# Altium schematic symbol library Tony_.SchLib: 178 symbols (part 1 of 6)
Pins are listed as number, name and electrical type; pins without a type are passive.

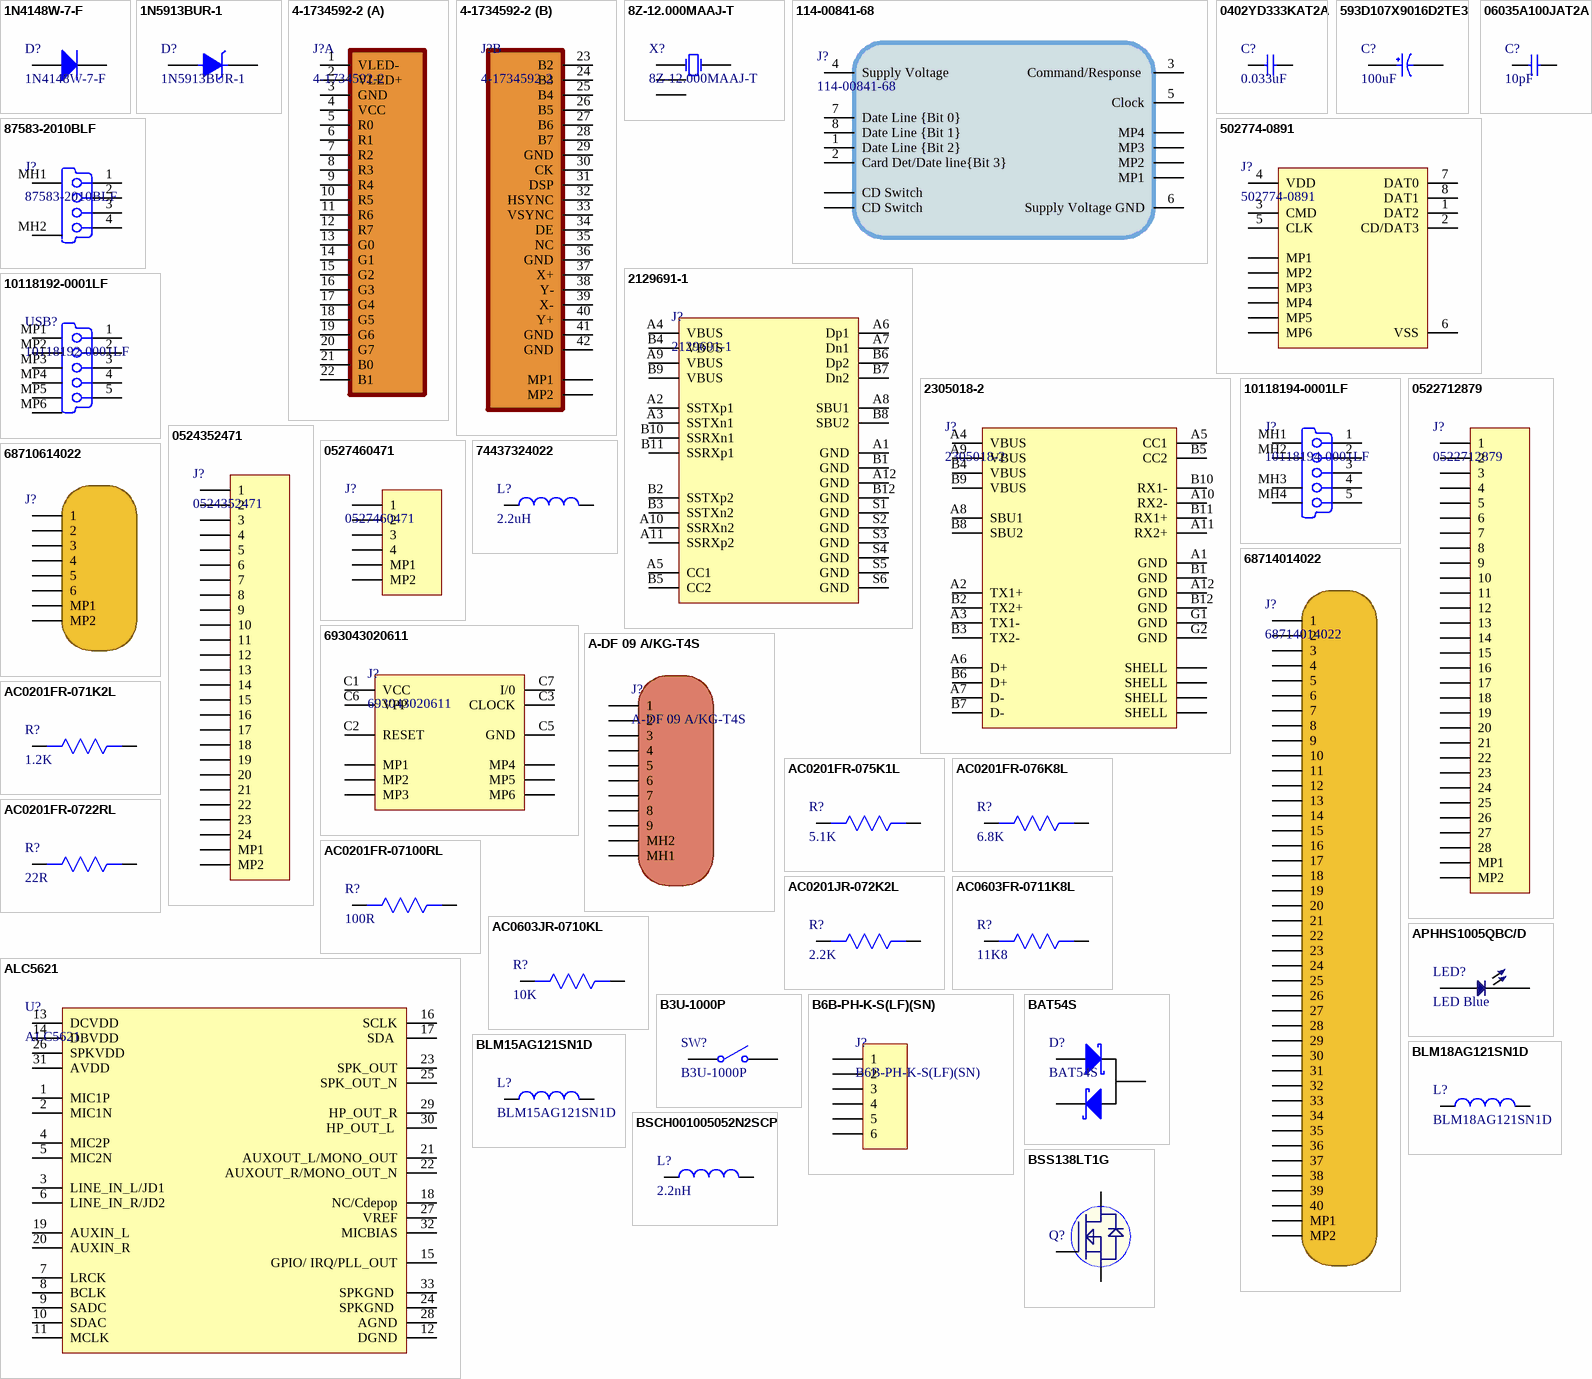
[diagram p0: symbols 1N4148W-7-F to BSS138LT1G]

## 1N4148W-7-F
designator D?
DIODE GEN PURP 100V 300MA SOD123; Manufacturer: Diodes; Forward Current: 150mA; Reverse Recovery Time: 4ns; Max Forward Surge Current (Ifsm): 2A; Element Configuration: Single; Peak Reverse Current: 1uA; Forward Voltage: 1.25V; Power Dissipation: 400mW; Polarity: Standard; Voltage Rating (DC): 75V; Capacitance: 2pF; Supplier 1: Digi-Key; Manufacturer Part Number: 1N4148W-7-F; Stock 1: 3949286; Pricing 1: 1=0.16, 10=0.146, 25=0.1388, 100=0.0611, 250=0.05868, 500=0.048, 1000=0.03333 (USD); Mount: Surface Mount; Number of Pins: 2; Weight: 0.000353oz; Contact Plating: Tin,Matte; Min Operating Temperature: -65°C; Max Operating Temperature: 150°C; Packaging: Tape and Reel; Max Repetitive Reverse Voltage (Vrrm): 100V; Peak Non-Repetitive Surge Current: 2A; Voltage: 100V; Max Surge Current: 2A; Package Quantity: 3000; Recovery Time: 4ns; Average Rectified Current: 300mA; Power Rating: 400mW; Current Rating: 150mA; Output Current: 150mA; Max Reverse Voltage (DC): 100V; Length: 2.85mm; Height: 1.25mm; Width: 1.7mm; Radiation Hardening: No; REACH SVHC: No SVHC; Lead Free: Lead Free; ComponentLink1URL: https://www.diodes.com/assets/Datasheets/ds30086.pdf?src-supplier=Digi-Key; ComponentLink1Description: https://www.diodes.com/assets/Datasheets/ds30086.pdf?src-supplier=Digi-Key; ComponentLink2URL: http://www.farnell.com/datasheets/2238378.pdf?src-supplier=Element14; ComponentLink2Description: http://www.farnell.com/datasheets/2238378.pdf?src-supplier=Element14; ComponentLink3URL: http://www.mouser.com/ds/2/115/ds30086-60872.pdf?src-supplier=Mouser; ComponentLink3Description: http://www.mouser.com/ds/2/115/ds30086-60872.pdf?src-supplier=Mouser; ComponentLink4URL: https://www.diodes.com/assets/Datasheets/ds30086.pdf?src-supplier=Avnet; ComponentLink4Description: https://www.diodes.com/assets/Datasheets/ds30086.pdf?src-supplier=Avnet; ComponentLink5URL: https://www.diodes.com/assets/Datasheets/ds30086.pdf?src-supplier=Avnet+Europe; ComponentLink5Description: https://www.diodes.com/assets/Datasheets/ds30086.pdf?src-supplier=Avnet+Europe; ComponentLink6URL: https://www.diodes.com/assets/Datasheets/ds30086.pdf?src-supplier=Verical; ComponentLink6Description: https://www.diodes.com/assets/Datasheets/ds30086.pdf?src-supplier=Verical; Supplier Part Number 1: 1N4148W-FDICT-ND
footprint SOD-123
pins: 1 A, 2 K

## 1N5913BUR-1
designator D?
DIODE ZENER 3.3V 1.25W DO213AB; Manufacturer: Microsemi; Tolerance: 5%; Impedance: 10R; Max Reverse Leakage Current: 100uA; Element Configuration: Single; Supplier 1: Mouser; Manufacturer Part Number: 1N5913BUR-1; RoHS: No; Category: Zener Diodes; Stock 1: 85; Pricing 1: 1=3.01000, 10=3.01000, 50=3.01000, 100=2.80000, 1000=2.80000, 10000=2.80000 (USD); Mount: Surface Mount; Case/Package: DO-213AB; Number of Pins: 2; Min Operating Temperature: -65°C; Max Operating Temperature: 175°C; Packaging: Bulk; Max Power Dissipation: 1.25W; Zener Voltage: 3.3V; Series: -; Radiation Hardening: Yes; RoHS Compliant: No; ComponentLink1URL: https://datasheet.ciiva.com/29596/lds-0300-1-29596489.pdf?src-supplier=Digi-Key; ComponentLink1Description: https://datasheet.ciiva.com/29596/lds-0300-1-29596489.pdf?src-supplier=Digi-Key; Supplier Part Number 1: 494-1N5913BUR-1
footprint DO-213AB
pins: 1 CATHODE, 2 ANODE

## 4-1734592-2
designator J?
CONN FPC BOTTOM 42POS 0.50MM R/A; Manufacturer: TE Connectivity; Connector Type: Receptacle,Connector,Socket; Wire/Cable Type: Flat Flex; Connector System: Flex-to-Board; Mating Alignment: Yes (With); PCB Mount Alignment: No (Without); PCB Mount Retention: With; Current Rating: 500mA; Voltage Rating: 250V; Shielding: Unshielded; Number of Positions: 42; Gender: Receptacle; PCB Mounting Orientation: Right Angle; Contact Resistance: 35mR; Pitch: 0.5mm; Plating Thickness: 0.025um; Supplier 1: Digi-Key; Manufacturer Part Number: 4-1734592-2; RoHS: Yes; Category: FFC / FPC; Stock 1: 5453; Pricing 1: 1=1.71000, 10=1.55300, 25=1.45800, 50=1.39480, 100=1.33130, 250=1.20456, 500=1.10944, 1000=0.95096, 2500=0.88756 (USD); Mount: Surface Mount; Housing Material: Polymer; Contact Plating: Gold; Contact Material: Bronze; Housing Color: Natural; Min Operating Temperature: -40°C; Max Operating Temperature: 85°C; Number of Rows: 1; Sealable: No (Without); Shrouded: Yes (With); Package Quantity: 2000; Packaging: Tape and Reel; Termination: SMD/SMT; Number of Contacts: 42; Contact Current Rating: 500mA; Orientation: Right Angle; Max Voltage Rating (AC): 250V; Length: 26.43mm; Width: 5.1mm; Height: 2.05mm; Flammability Rating: UL94 V-0; ELV: Compliant; REACH SVHC: Unknown; ComponentLink1URL: https://datasheet.ciiva.com/5751/1650059-5751062.pdf?src-supplier=Farnell; ComponentLink1Description: https://datasheet.ciiva.com/5751/1650059-5751062.pdf?src-supplier=Farnell; ComponentLink2URL: https://datasheet.ciiva.com/669/eng-cd-1734592-c-c-1734592-669223.pdf?src-supplier=Digi-Key; ComponentLink2Description: https://datasheet.ciiva.com/669/eng-cd-1734592-c-c-1734592-669223.pdf?src-supplier=Digi-Key; ComponentLink3URL: https://datasheet.ciiva.com/669/eng-cd-1734592-c-c-1734592-669224.pdf?src-supplier=Digi-Key; ComponentLink3Description: https://datasheet.ciiva.com/669/eng-cd-1734592-c-c-1734592-669224.pdf?src-supplier=Digi-Key; ComponentLink4URL: https://datasheet.ciiva.com/669/eng-cd-1734592-c-c-1734592-669225.pdf?src-supplier=Digi-Key; ComponentLink4Description: https://datasheet.ciiva.com/669/eng-cd-1734592-c-c-1734592-669225.pdf?src-supplier=Digi-Key; ComponentLink5URL: https://datasheet.ciiva.com/8066/1650059-8066860.pdf?src-supplier=Element14; ComponentLink5Description: https://datasheet.ciiva.com/8066/1650059-8066860.pdf?src-supplier=Element14; ComponentLink6URL: https://datasheet.ciiva.com/10365/eng-ds-1-1773440-6-0506-10365933.pdf?src-supplier=Avnet; ComponentLink6Description: https://datasheet.ciiva.com/10365/eng-ds-1-1773440-6-0506-10365933.pdf?src-supplier=Avnet; ComponentLink7URL: https://datasheet.ciiva.com/30083/eng-ds-1-1773440-6-0506-30083485.pdf?src-supplier=Onlinecomponents.com; ComponentLink7Description: https://datasheet.ciiva.com/30083/eng-ds-1-1773440-6-0506-30083485.pdf?src-supplier=Onlinecomponents.com; Supplier Part Number 1: A101322CT-ND
footprint 4-1734592-2 (CONN FPC BOTTOM 42POS 0.50MM R/A)
part A pins: 1 VLED-, 2 VLED+, 3 GND, 4 VCC, 5 R0, 6 R1, 7 R2, 8 R3, 9 R4, 10 R5, 11 R6, 12 R7, 13 G0, 14 G1, 15 G2, 16 G3, 17 G4, 18 G5, 19 G6, 20 G7, 21 B0, 22 B1
part B pins: 23 B2, 24 B3, 25 B4, 26 B5, 27 B6, 28 B7, 29 GND, 30 CK, 31 DSP, 32 HSYNC, 33 VSYNC, 34 DE, 35 NC, 36 GND, 37 X+, 38 Y-, 39 X-, 40 Y+, 41 GND, 42 GND, MP1, MP2

## 8Z-12.000MAAJ-T
designator X?
CRYSTAL 12.0000MHZ 18PF SMD; Manufacturer: TXC; Frequency: 12MHz; Frequency Tolerance: 30ppm; ESR (Equivalent Series Resistance): 150R; Supplier 1: Mouser; Manufacturer Part Number: 8Z-12.000MAAJ-T; RoHS: Yes; Category: Crystals; Stock 1: 33; Pricing 1: 1=1.41000, 10=1.36000, 50=1.33000, 100=1.13000, 1000=0.93000, 10000=0.78000 (USD); Mount: Surface Mount; Case/Package: SMD/SMT; Number of Pins: 4; Min Operating Temperature: -20°C; Max Operating Temperature: 70°C; Package Quantity: 1; Load Capacitance: 18pF; Packaging: Tape and Reel; Tolerance: 30ppm; Frequency Stability: 30ppm; Termination: SMD/SMT; Series: 8Z; Length: 2.5mm; Width: 0.079inch; Height: 0.022inch; Depth: 2mm; REACH SVHC: No SVHC; RoHS Compliant: Yes; ComponentLink1URL: https://datasheet.ciiva.com/28498/1838674-28498900.pdf?src-supplier=Element14; ComponentLink1Description: https://datasheet.ciiva.com/28498/1838674-28498900.pdf?src-supplier=Element14; ComponentLink2URL: https://datasheet.ciiva.com/4950/8z-12784-4950167.pdf?src-supplier=Mouser; ComponentLink2Description: https://datasheet.ciiva.com/4950/8z-12784-4950167.pdf?src-supplier=Mouser; ComponentLink3URL: https://datasheet.ciiva.com/859/8z-859073.pdf?src-supplier=Digi-Key; ComponentLink3Description: https://datasheet.ciiva.com/859/8z-859073.pdf?src-supplier=Digi-Key; ComponentLink4URL: https://datasheet.ciiva.com/859/8z-859071.pdf?src-supplier=Digi-Key; ComponentLink4Description: https://datasheet.ciiva.com/859/8z-859071.pdf?src-supplier=Digi-Key; ComponentLink5URL: https://datasheet.ciiva.com/859/8z-859072.pdf?src-supplier=Digi-Key; ComponentLink5Description: https://datasheet.ciiva.com/859/8z-859072.pdf?src-supplier=Digi-Key; ComponentLink6URL: https://datasheet.ciiva.com/8047/1041872-8047871.pdf?src-supplier=Element14; ComponentLink6Description: https://datasheet.ciiva.com/8047/1041872-8047871.pdf?src-supplier=Element14; Supplier Part Number 1: 717-8Z-12.000MAAJ-T
footprint 8Z-12.000MAAJ-T
pins: 1 OSC1, 2 GND, 3 OSC2, 4 GND

## 114-00841-68
designator J?
CONN MICRO SD CARD PUSH-PULL R/A; Manufacturer: AMPHENOL ICC (COMMERCIAL PRODUCTS); Connector Type: Connector; Supplier 1: Digi-Key; Manufacturer Part Number: 114-00841-68; Stock 1: 29968; Pricing 1: 1=1.32, 10=1.194, 25=1.1208, 50=1.0722, 100=1.0235, 250=0.926, 500=0.8529 (USD); Mount: Surface Mount; Contact Plating: Gold; Packaging: Tape and Reel; Supplier Part Number 1: 114-00841-68-6-ND
footprint 114-00841-68
pins: 1 Date Line {Bit 2}, 2 Card Det/Date line{Bit 3}, 3 Command/Response , 4 Supply Voltage (power), 5 Clock, 6 Supply Voltage GND (power), 7 Date Line {Bit 0}, 8 Date Line {Bit 1}, #CD Switch CD Switch, *CD Switch CD Switch, MP1, MP2, MP3, MP4

## 0402YD333KAT2A
designator C?, comment 0.033uF
CAP CER 0.033UF 16V X5R 0402; Manufacturer: Kyocera AVX; Manufacturer Part Number: 0402YD333KAT2A; Capacitance: 33nF; Tolerance: 10%; Supplier 1: Digi-Key; RoHS: Yes; Category: Ceramic Capacitors; Stock 1: 19862; Pricing 1: 1=0.14000, 10=0.10200, 50=0.05780, 100=0.04780, 500=0.03356, 1000=0.02778, 2500=0.02585, 5000=0.02365 (USD); Mount: Surface Mount; Case/Package: 0402; Number of Pins: 2; Case Code (Metric): 1005; Case Code (Imperial): 0402; Weight: 2.3E-05oz; Min Operating Temperature: -55°C; Max Operating Temperature: 85°C; Packaging: Tape and Reel; Voltage Rating (DC): 16V; Dielectric: X5R; Voltage Rating: 16V; Package Quantity: 10000; Termination: SMD/SMT; Series: 0402; Construction: Flat; Length: 1mm; Width: 0.02inch; Height: 0.56mm; Thickness: 0.022inch; Depth: 0.5mm; Radiation Hardening: No; REACH SVHC: No SVHC; Lead Free: Lead Free; RoHS Compliant: Yes; ComponentLink1URL: https://datasheet.ciiva.com/22619/1666675-22619797.pdf?src-supplier=Element14; ComponentLink1Description: https://datasheet.ciiva.com/22619/1666675-22619797.pdf?src-supplier=Element14; ComponentLink2URL: https://datasheet.ciiva.com/150/cx5r-150518.pdf?src-supplier=Digi-Key; ComponentLink2Description: https://datasheet.ciiva.com/150/cx5r-150518.pdf?src-supplier=Digi-Key; ComponentLink3URL: https://datasheet.ciiva.com/150/cx5r-150519.pdf?src-supplier=Digi-Key; ComponentLink3Description: https://datasheet.ciiva.com/150/cx5r-150519.pdf?src-supplier=Digi-Key; ComponentLink4URL: https://datasheet.ciiva.com/150/cx5r-150520.pdf?src-supplier=Digi-Key; ComponentLink4Description: https://datasheet.ciiva.com/150/cx5r-150520.pdf?src-supplier=Digi-Key; ComponentLink5URL: https://datasheet.ciiva.com/28454/1666675-28454250.pdf?src-supplier=Element14; ComponentLink5Description: https://datasheet.ciiva.com/28454/1666675-28454250.pdf?src-supplier=Element14; ComponentLink6URL: https://datasheet.ciiva.com/5421/cx5r-5421803.pdf?src-supplier=Mouser; ComponentLink6Description: https://datasheet.ciiva.com/5421/cx5r-5421803.pdf?src-supplier=Mouser; ComponentLink7URL: https://datasheet.ciiva.com/15212/getdatasheetpartid-310214-15212123.pdf?src-supplier=Verical; ComponentLink7Description: https://datasheet.ciiva.com/15212/getdatasheetpartid-310214-15212123.pdf?src-supplier=Verical; Supplier Part Number 1: 478-1123-1-ND
footprint Cap0402
pins: 1, 2

## 593D107X9016D2TE3
designator C?, comment 100uF
CAP TANT 100UF 10% 16V 2917; Manufacturer: Vishay Sprague; Manufacturer Part Number: 593D107X9016D2TE3; Tolerance: 20%; ESR (Equivalent Series Resistance): 125mR; Ripple Current: 1.1mA; Leakage Current: 16uA; Polarity: Polar; Dissipation Factor: 8%; Supplier 1: Digi-Key; Stock 1: 7834; Pricing 1: 1=0.99, 10=0.783, 100=0.5874 (USD); Mount: Surface Mount,PCB; Case/Package: 2917; Number of Pins: 2; Weight: 0.023634oz; Case Code (Metric): 7343; Case Code (Imperial): 2917; Min Operating Temperature: -55°C; Max Operating Temperature: 125°C; Capacitance: 100uF; Packaging: Tape and Reel; Voltage Rating: 16V; Package Quantity: 1; Voltage Rating (DC): 16V; Termination: SMD/SMT; Voltage: 16V; Features: General Purpose; Length: 7.3mm; Height: 2.8mm; Depth: 4.3mm; Width: 0.169inch; Height - Seated (Max): 0.122inch; Radiation Hardening: No; REACH SVHC: Unknown; Lead Free: Lead Free; ComponentLink1URL: http://www.vishay.com/docs/40005/593d.pdf?src-supplier=Avnet; ComponentLink1Description: http://www.vishay.com/docs/40005/593d.pdf?src-supplier=Avnet; ComponentLink2URL: http://documents.rs-components.com/techlib://itc_doclist_GB.htm?stockno=6844477&src-supplier=RSComponents; ComponentLink2Description: http://documents.rs-components.com/techlib://itc_doclist_GB.htm?stockno=6844477&src-supplier=RSComponents; ComponentLink3URL: http://www.vishay.com/docs/40005/593d.pdf?src-supplier=Avnet+Europe; ComponentLink3Description: http://www.vishay.com/docs/40005/593d.pdf?src-supplier=Avnet+Europe; ComponentLink4URL: http://www.vishay.com/docs/40005/593d.pdf?src-supplier=Digi-Key; ComponentLink4Description: http://www.vishay.com/docs/40005/593d.pdf?src-supplier=Digi-Key; ComponentLink5URL: http://www.mouser.com/ds/2/427/593d-239975.pdf?src-supplier=Mouser; ComponentLink5Description: http://www.mouser.com/ds/2/427/593d-239975.pdf?src-supplier=Mouser; ComponentLink6URL: https://www.alliedelec.com/m/d/4999163682384315a74ef22064734d6b.pdf?src-supplier=Allied+Electronics; ComponentLink6Description: https://www.alliedelec.com/m/d/4999163682384315a74ef22064734d6b.pdf?src-supplier=Allied+Electronics; Supplier Part Number 1: 718-1102-1-ND
footprint 593D107X9016D2TE3
pins: 1, 2

## 06035A100JAT2A
designator C?, comment 10pF
CAP CER 10PF 50V C0G/NP0 0603; Manufacturer: Kyocera AVX; Manufacturer Part Number: 06035A100JAT2A/4K; Tolerance: 5%; Dielectric: C0G; Temperature Coefficient: 30ppm/°C; Insulation Resistance: 100GR; Supplier 1: Digi-Key; Stock 1: 196463; Pricing 1: 1=0.1, 10=0.05, 50=0.0272, 100=0.0222, 500=0.01586, 1000=0.01246 (USD); Mount: Surface Mount; Case/Package: 0603; Number of Pins: 2; Min Operating Temperature: -55°C; Max Operating Temperature: 125°C; Capacitance: 10pF; Packaging: Cut Tape; Voltage Rating (DC): 50V; Voltage: 50V; Length: 1.6mm; Width: 810um; Height: 0.9mm; Depth: 0.81mm; Thickness: 864um; REACH SVHC: No SVHC; Lead Free: Lead Free; Supplier Part Number 1: 478-1163-1-ND
footprint CAP-0603
footprint Cap0603
pins: 1, 2

## 87583-2010BLF
designator J?
USB Connectors 4P RECEPTACLE TYPE A; Manufacturer: Amphenol FCI; Plating: Nickel; Number of Terminals/Pins: 4; Current Rating: 1A; Mating Cycles: 1500; Connector Type: USB,Receptacle; Number of Ports: 1; Contact Resistance: 30mR; Insulation Resistance: 1GR; USB Standard: USB 2.0; Supplier 1: Allied Electronics; Manufacturer Part Number: 87583-2010BLF; RoHS: Yes; Category: Connectors; Mount: Surface Mount,Horizontal; Contact Plating: GXT,Gold; Color: White; Contact Material: Copper Alloy; Body Plating: Nickel; Material: Tin; Housing Material: Thermoplastic; Min Operating Temperature: 0°C; Max Operating Temperature: 40°C; Termination: Solder; Gender: Receptacle; Packaging: Rail/Tube; Number of Contacts: 4; Orientation: Right Angle; Package Quantity: 42; Interface: USB; Number of Positions: 4; Series: 87583; Length: 14.5mm; Depth: 14mm; Radiation Hardening: No; Flammability Rating: UL94 V-0; REACH SVHC: No SVHC; RoHS Compliant: Yes; ComponentLink1URL: https://datasheet.ciiva.com/851/87583-851211.pdf?src-supplier=Digi-Key; ComponentLink1Description: https://datasheet.ciiva.com/851/87583-851211.pdf?src-supplier=Digi-Key; ComponentLink2URL: https://datasheet.ciiva.com/1100/57319-1100818.pdf?src-supplier=Newark; ComponentLink2Description: https://datasheet.ciiva.com/1100/57319-1100818.pdf?src-supplier=Newark; ComponentLink3URL: https://datasheet.ciiva.com/25614/0900766b8118e6e2-25614557.pdf?src-supplier=RSComponents; ComponentLink3Description: https://datasheet.ciiva.com/25614/0900766b8118e6e2-25614557.pdf?src-supplier=RSComponents; ComponentLink4URL: https://datasheet.ciiva.com/4599/gs-12-095-532824-4599287.pdf?src-supplier=Mouser; ComponentLink4Description: https://datasheet.ciiva.com/4599/gs-12-095-532824-4599287.pdf?src-supplier=Mouser; ComponentLink5URL: https://datasheet.ciiva.com/15181/getdatasheetpartid-106468-15181159.pdf?src-supplier=Verical; ComponentLink5Description: https://datasheet.ciiva.com/15181/getdatasheetpartid-106468-15181159.pdf?src-supplier=Verical; ComponentLink6URL: https://datasheet.ciiva.com/3094/87583-3094440.pdf?src-supplier=Avnet; ComponentLink6Description: https://datasheet.ciiva.com/3094/87583-3094440.pdf?src-supplier=Avnet; ComponentLink7URL: https://datasheet.ciiva.com/14619/70236897-14619037.pdf?src-supplier=Allied+Electronics; ComponentLink7Description: https://datasheet.ciiva.com/14619/70236897-14619037.pdf?src-supplier=Allied+Electronics; Supplier Part Number 1: 70236897
footprint 87583-2010BLF
pins: 1 V BUS (5V) "USB Vcc [Red]", 2 D- "USB Data - [White]", 3 D+ "USB Data + [Green]", 4 GND "Not Connected (or joined to pin 5 via resistor)", MH1 Tab "Shell", MH2 Tab "Shell"

## 502774-0891
designator J?
CONN MICRO SD CARD PUSH-PUSH R/A; Manufacturer: Molex; Manufacturer Part Number: 5027740891; Number of Contacts: 8; Gender: Male; Max Voltage Rating (DC): 1.01kV; Connector Type: Connector; Current Rating: 500mA; Voltage Rating (AC): 10V; Pitch: 1.1mm; Supplier 1: Digi-Key; RoHS: Yes; Category: FFC / FPC; Stock 1: 8227; Pricing 1: 1=3.16000, 10=2.77900, 100=2.21100 (USD); Mount: Surface Mount,Reverse; Contact Material: Copper Alloy,Copper; Contact Plating: Gold; Housing Material: Polymer; Min Operating Temperature: -25°C; Max Operating Temperature: 85°C; Number of Rows: 1; Orientation: Right Angle; Packaging: Tape and Reel; Termination: Solder; Package Quantity: 1; Number of Circuits: 8; Length: 14.6mm; Width: 1.8mm; Height: 1.8mm; Depth: 16mm; Radiation Hardening: No; REACH SVHC: Unknown; Halogen Free: Low Halogen; ComponentLink1URL: https://datasheet.ciiva.com/15226/getdatasheetpartid-119109-15226226.pdf?src-supplier=Verical; ComponentLink1Description: https://datasheet.ciiva.com/15226/getdatasheetpartid-119109-15226226.pdf?src-supplier=Verical; ComponentLink2URL: https://datasheet.ciiva.com/16655/5027740891-memory-card-socket-16655603.pdf?src-supplier=Avnet+Europe; ComponentLink2Description: https://datasheet.ciiva.com/16655/5027740891-memory-card-socket-16655603.pdf?src-supplier=Avnet+Europe; ComponentLink3URL: https://datasheet.ciiva.com/11755/0900766b80f752a0-11755064.pdf?src-supplier=RSComponents; ComponentLink3Description: https://datasheet.ciiva.com/11755/0900766b80f752a0-11755064.pdf?src-supplier=RSComponents; ComponentLink4URL: https://datasheet.ciiva.com/683/5027740891-sd-683628.pdf?src-supplier=Digi-Key; ComponentLink4Description: https://datasheet.ciiva.com/683/5027740891-sd-683628.pdf?src-supplier=Digi-Key; ComponentLink5URL: https://datasheet.ciiva.com/1104/ps-502774-001-1104670.pdf?src-supplier=Element14; ComponentLink5Description: https://datasheet.ciiva.com/1104/ps-502774-001-1104670.pdf?src-supplier=Element14; ComponentLink6URL: https://datasheet.ciiva.com/4581/5027740891-memory-card-socket-179575-4581102.pdf?src-supplier=Mouser; ComponentLink6Description: https://datasheet.ciiva.com/4581/5027740891-memory-card-socket-179575-4581102.pdf?src-supplier=Mouser; ComponentLink7URL: https://datasheet.ciiva.com/1104/1499551-1104671.pdf?src-supplier=Element14; ComponentLink7Description: https://datasheet.ciiva.com/1104/1499551-1104671.pdf?src-supplier=Element14; ComponentLink8URL: https://datasheet.ciiva.com/683/5027740891-sd-683629.pdf?src-supplier=Digi-Key; ComponentLink8Description: https://datasheet.ciiva.com/683/5027740891-sd-683629.pdf?src-supplier=Digi-Key; ComponentLink9URL: https://datasheet.ciiva.com/683/5027740891-sd-683630.pdf?src-supplier=Digi-Key; ComponentLink9Description: https://datasheet.ciiva.com/683/5027740891-sd-683630.pdf?src-supplier=Digi-Key; Supplier Part Number 1: WM24066CT-ND
footprint 5027740891 (CONN MICRO SD CARD PUSH-PUSH R/A)
pins: 1 DAT2, 2 CD/DAT3, 3 CMD, 4 VDD, 5 CLK, 6 VSS, 7 DAT0, 8 DAT1, MP1, MP2, MP3, MP4, MP5, MP6

## 2129691-1
designator J?
CONN RCPT USB3.1 TYPEC 24POS SMD; Manufacturer: TE Connectivity AMP; Plating: Bright; Gender: Receptacle; Number of Ports: 1; Contact Current Rating: 5A; Circuit Application: Signal; Connector System: Cable-to-Board; Number of Positions: 24; Plating Thickness: 0.75um; Pitch: 0.5mm; Supplier 1: Digi-Key; Manufacturer Part Number: 2129691-1; RoHS: Yes; Category: Connectors; Stock 1: 1452; Pricing 1: 1=2.89000, 10=2.77000, 25=2.53880, 50=2.42340, 100=2.30810, 250=2.01956, 500=1.96186 (USD); Mount: Surface Mount; Number of Pins: 24; Contact Material: Copper Alloy; Contact Plating: Gold; Housing Color: Black; Housing Material: Thermoplastic; Min Operating Temperature: -30°C; Max Operating Temperature: 85°C; Orientation: Right Angle; Packaging: Tape and Reel; Termination: Solder; Connector Type: Receptacle; USB Standard: USB 3.1; Length: 12.35mm; REACH SVHC: Unknown; Lead Free: Lead Free; RoHS Compliant: Yes; ComponentLink1URL: http://www.farnell.com/datasheets/1993946.pdf?src-supplier=Farnell; ComponentLink1Description: http://www.farnell.com/datasheets/1993946.pdf?src-supplier=Farnell; ComponentLink2URL: https://media.digikey.com/pdf/Data%20Sheets/Tyco%20Electonics%20AMP%20PDFs/2129691_Dwg.pdf?src-supplier=Digi-Key; ComponentLink2Description: https://media.digikey.com/pdf/Data%20Sheets/Tyco%20Electonics%20AMP%20PDFs/2129691_Dwg.pdf?src-supplier=Digi-Key; ComponentLink3URL: http://www.farnell.com/datasheets/2292385.pdf?src-supplier=Farnell; ComponentLink3Description: http://www.farnell.com/datasheets/2292385.pdf?src-supplier=Farnell; ComponentLink4URL: http://www.alliedelec.com/images/products/datasheets/bm/TE_Connectivity/70718395.pdf?src-supplier=Allied+Electronics; ComponentLink4Description: http://www.alliedelec.com/images/products/datasheets/bm/TE_Connectivity/70718395.pdf?src-supplier=Allied+Electronics; ComponentLink5URL: http://www.farnell.com/cad/1993947.pdf?src-supplier=Element14; ComponentLink5Description: http://www.farnell.com/cad/1993947.pdf?src-supplier=Element14; ComponentLink6URL: http://www.farnell.com/datasheets/1993946.pdf?src-supplier=Element14; ComponentLink6Description: http://www.farnell.com/datasheets/1993946.pdf?src-supplier=Element14; ComponentLink7URL: http://www.farnell.com/datasheets/2292385.pdf?src-supplier=Newark; ComponentLink7Description: http://www.farnell.com/datasheets/2292385.pdf?src-supplier=Newark; ComponentLink8URL: http://www.te.com/commerce/DocumentDelivery/DDEController?Action=showdoc&DocId=Customer+Drawing%7F2129691%7F6%7Fpdf%7FEnglish%7FENG_CD_2129691_6.pdf%7F2129691-1&src-supplier=Avnet; ComponentLink8Description: http://www.te.com/commerce/DocumentDelivery/DDEController?Action=showdoc&DocId=Customer+Drawing%7F2129691%7F6%7Fpdf%7FEnglish%7FENG_CD_2129691_6.pdf%7F2129691-1&src-supplier=Avnet; Supplier Part Number 1: A122008CT-ND
footprint TE_2129691-1
pins: A1 GND, A2 SSTXp1, A3 SSTXn1, A4 VBUS, A5 CC1, A6 Dp1, A7 Dn1, A8 SBU1, A9 VBUS, A10 SSRXn2, A11 SSRXp2, A12 GND, B1 GND, B2 SSTXp2, B3 SSTXn2, B4 VBUS, B5 CC2, B6 Dp2, B7 Dn2, B8 SBU2, B9 VBUS, B10 SSRXn1, B11 SSRXp1, B12 GND, S1 GND, S2 GND, S3 GND, S4 GND, S5 GND, S6 GND

## 2305018-2
designator J?
CONN RCP USB3.1 TYPEC 24P SMD RA; Manufacturer: TE Connectivity AMP; Connector Type: USB; Number of Contacts: 24; Gender: Receptacle; Number of Ports: 1; Current Rating: 1.25A; Voltage Rating: 30V; Shielding: Shielded; Ratings: Waterproof; Supplier 1: Digi-Key; Manufacturer Part Number: 2305018-2; RoHS: Yes; Category: USB Connectors; Stock 1: 4590; Pricing 1: 1=3.00000, 10=2.87800, 25=2.63840, 50=2.51840, 100=2.39840, 250=2.09864 (USD); Mount: Surface Mount,Through Hole; Contact Plating: Gold; Insulation Color: Black; Min Operating Temperature: -40°C; Max Operating Temperature: 85°C; Packaging: Tape and Reel; Termination: Solder; Flammability Rating: UL94 V-0; RoHS Compliant: Yes; ComponentLink1URL: http://www.farnell.com/datasheets/2611889.pdf?src-supplier=Farnell; ComponentLink1Description: http://www.farnell.com/datasheets/2611889.pdf?src-supplier=Farnell; ComponentLink2URL: https://www.te.com/commerce/DocumentDelivery/DDEController?Action=srchrtrv&DocNm=2305018&DocType=Customer+Drawing&DocLang=English&src-supplier=Digi-Key; ComponentLink2Description: https://www.te.com/commerce/DocumentDelivery/DDEController?Action=srchrtrv&DocNm=2305018&DocType=Customer+Drawing&DocLang=English&src-supplier=Digi-Key; ComponentLink3URL: http://www.farnell.com/datasheets/2611889.pdf?src-supplier=Newark; ComponentLink3Description: http://www.farnell.com/datasheets/2611889.pdf?src-supplier=Newark; Supplier Part Number 1: A132569CT-ND
footprint 2305018-2 (CONN RCP USB3.1 TYPEC 24P SMD RA)
pins: A1 GND (power), A2 TX1+, A3 TX1-, A4 VBUS (power), A5 CC1, A6 D+, A7 D-, A8 SBU1, A9 VBUS (power), A10 RX2-, A11 RX2+, A12 GND (power), B1 GND (power), B2 TX2+, B3 TX2-, B4 VBUS (power), B5 CC2, B6 D+, B7 D-, B8 SBU2, B9 VBUS (power), B10 RX1-, B11 RX1+, B12 GND (power), G1 GND (power), G2 GND (power), S1 SHELL, S2 SHELL, S3 SHELL, S4 SHELL

## 10118192-0001LF
designator USB?
CONN USB MICRO B RECPT SMT R/A; Manufacturer: Amphenol FCI; Gender: Receptacle; Current Rating: 1.8A; Connector Type: USB,Receptacle; Number of Contacts: 5; Insulation Resistance: 1GR; Number of Ports: 1; Max Voltage Rating (AC): 100V; USB Standard: USB 2.0; Pitch: 0.65mm; Supplier 1: Digi-Key; Manufacturer Part Number: 10118192-0001LF; Stock 1: 203283; Pricing 1: 1=0.42, 10=0.393, 25=0.3536, 50=0.3144, 100=0.3013, 250=0.2751, 500=0.262 (USD); Mount: Surface Mount,Horizontal; Contact Material: Copper Alloy; Contact Plating: Nickel,Gold; Colour: Black; Number of Terminals: 5; Housing Material: Polymer; Min Operating Temperature: -55°C; Max Operating Temperature: 85°C; Termination: Solder; Orientation: Right Angle; Packaging: Tape and Reel; Package Quantity: 1400; Voltage Rating: 100V; Length: 7.86mm; Depth: 5.57mm; Radiation Hardening: No; Lead Free: Lead Free; Flammability Rating: UL94 V-0; REACH SVHC: No SVHC; ComponentLink1URL: https://datasheet.ciiva.com/26853/getdatasheetpartid-418041-26853891.pdf; ComponentLink1Description: https://datasheet.ciiva.com/26853/getdatasheetpartid-418041-26853891.pdf; ComponentLink2URL: https://datasheet.ciiva.com/851/10118192-851112.pdf; ComponentLink2Description: https://datasheet.ciiva.com/851/10118192-851112.pdf; ComponentLink3URL: https://datasheet.ciiva.com/4598/10118192ac-197249-4598796.pdf; ComponentLink3Description: https://datasheet.ciiva.com/4598/10118192ac-197249-4598796.pdf; Supplier Part Number 1: 609-4613-1-ND
footprint Micro Usb Conn SMD (CONN RCPT USB2.0 MICRO B SMD R/A)
pins: 1 V BUS (5V) "USB Vcc [Red]", 2 D- "USB Data - [White]", 3 D+ "USB Data + [Green]", 4 NC "Not Connected (or joined to pin 5 via resistor)", 5 GND "Ground [Black]", MP1 Tab "Shell", MP2 Tab "Shell", MP3 Tab "Shell", MP4 Tab "Shell", MP5 Tab "Shell", MP6 Tab "Shell"

## 10118194-0001LF
designator J?
USB - Micro B Female USB 2 5 SMD USB Connectors RoHS; Manufacturer: Amphenol FCI; Gender: Receptacle; Current Rating: 1.8A; Connector Type: USB,Receptacle; Number of Contacts: 5; Insulation Resistance: 1GR; Number of Ports: 1; Max Voltage Rating (AC): 100V; Pitch: 0.65mm; Supplier 1: Digi-Key; Manufacturer Part Number: 10118194-0001LF; Stock 1: 35943; Pricing 1: 1=0.43, 10=0.405, 25=0.3648, 50=0.3242, 100=0.3107, 250=0.28368, 500=0.27016 (USD); Mount: Surface Mount,Horizontal; Color: Black; Contact Material: Copper Alloy; Contact Plating: Gold; Number of Terminals: 5; Housing Material: Polymer; Min Operating Temperature: -55°C; Max Operating Temperature: 85°C; Package Quantity: 9600; Packaging: Tape and Reel; Termination: Solder; Orientation: Right Angle; Features: Shielded; Length: 8.05mm; Depth: 5mm; Radiation Hardening: No; Lead Free: Lead Free; Flammability Rating: UL94 V-0; ComponentLink1URL: http://www.amphenol-icc.com/media/wysiwyg/files/drawing/10118194.pdf?src-supplier=Digi-Key; ComponentLink1Description: http://www.amphenol-icc.com/media/wysiwyg/files/drawing/10118194.pdf?src-supplier=Digi-Key; ComponentLink2URL: https://cdn.amphenol-icc.com/media/wysiwyg/files/drawing/10118194.pdf?src-supplier=Mouser; ComponentLink2Description: https://cdn.amphenol-icc.com/media/wysiwyg/files/drawing/10118194.pdf?src-supplier=Mouser; ComponentLink3URL: https://cdn.amphenol-icc.com/media/wysiwyg/files/drawing/10118194.pdf?src-supplier=Verical; ComponentLink3Description: https://cdn.amphenol-icc.com/media/wysiwyg/files/drawing/10118194.pdf?src-supplier=Verical; Supplier Part Number 1: 609-4618-1-ND
footprint 10118194-0001LF
pins: 1 V BUS (5V) "USB Vcc [Red]", 2 D- "USB Data - [White]", 3 D+ "USB Data + [Green]", 4 NC "Not Connected (or joined to pin 5 via resistor)", 5 GND "Ground [Black]", MH1 Tab "Shell", MH2 Tab "Shell", MH3 Tab "Shell", MH4 Tab "Shell"

## 0522712879
designator J?
CONN FPC BOTTOM 28POS 1.00MM R/A; Manufacturer: Molex; Manufacturer Part Number: 52271-2879; Current Rating: 500mA; Voltage Rating: 50V; Max Voltage Rating (DC): 5.05kV; Number of Positions: 28; Gender: Receptacle; Contact Resistance: 20mR; Mating Cycles: 30; Insulation Resistance: 100MR; Wire/Cable Type: Flat Flex; Stackable: No; Pitch: 1mm; Supplier 1: Digi-Key; RoHS: Yes; Category: FFC / FPC; Stock 1: 2640; Pricing 1: 1=2.20000, 10=1.87700, 100=1.55060 (USD); Contact Material: Bronze; Contact Plating: Tin; Housing Material: Nylon; Material: Nylon,Polyamide; Min Operating Temperature: -40°C; Max Operating Temperature: 85°C; Package Quantity: 1000; Number of Rows: 1; Packaging: Tape and Reel; Termination: SMD/SMT; Number of Contacts: 28; Orientation: Right Angle; Series: 52271; Contact Location: Bottom; Voltage Rating (DC): 50V; Number of Circuits: 28; Radiation Hardening: No; Flammability Rating: UL94 V-0; RoHS Compliant: Yes; REACH SVHC: Unknown; ELV: Compliant; ComponentLink1URL: https://datasheet.ciiva.com/5137/0522712879-ffc-fpc-connectors-170488-5137106.pdf?src-supplier=Mouser; ComponentLink1Description: https://datasheet.ciiva.com/5137/0522712879-ffc-fpc-connectors-170488-5137106.pdf?src-supplier=Mouser; ComponentLink2URL: https://datasheet.ciiva.com/16659/0522712879-ffc-fpc-connectors-16659954.pdf?src-supplier=Avnet+Europe; ComponentLink2Description: https://datasheet.ciiva.com/16659/0522712879-ffc-fpc-connectors-16659954.pdf?src-supplier=Avnet+Europe; ComponentLink3URL: https://datasheet.ciiva.com/11745/0900766b8078fc3a-11745108.pdf?src-supplier=RSComponents; ComponentLink3Description: https://datasheet.ciiva.com/11745/0900766b8078fc3a-11745108.pdf?src-supplier=RSComponents; ComponentLink4URL: https://datasheet.ciiva.com/23691/1626065-23691209.pdf?src-supplier=Newark; ComponentLink4Description: https://datasheet.ciiva.com/23691/1626065-23691209.pdf?src-supplier=Newark; ComponentLink5URL: https://datasheet.ciiva.com/16120/217080522712879-ffc-fpc-nectors-16120299.pdf?src-supplier=Onlinecomponents.com; ComponentLink5Description: https://datasheet.ciiva.com/16120/217080522712879-ffc-fpc-nectors-16120299.pdf?src-supplier=Onlinecomponents.com; ComponentLink6URL: https://datasheet.ciiva.com/30248/280870522712879-ffc-fpc-nectors-30248751.pdf?src-supplier=Onlinecomponents.com; ComponentLink6Description: https://datasheet.ciiva.com/30248/280870522712879-ffc-fpc-nectors-30248751.pdf?src-supplier=Onlinecomponents.com; ComponentLink7URL: https://datasheet.ciiva.com/8038/1828665-8038412.pdf?src-supplier=Element14; ComponentLink7Description: https://datasheet.ciiva.com/8038/1828665-8038412.pdf?src-supplier=Element14; ComponentLink8URL: https://datasheet.ciiva.com/8038/1864685-8038413.pdf?src-supplier=Element14; ComponentLink8Description: https://datasheet.ciiva.com/8038/1864685-8038413.pdf?src-supplier=Element14; Supplier Part Number 1: WM7966CT-ND
footprint 0522712879
pins: 1, 2, 3, 4, 5, 6, 7, 8, 9, 10, 11, 12, 13, 14, 15, 16, 17, 18, 19, 20, 21, 22, 23, 24, 25, 26, 27, 28, MP1, MP2

## 0524352471
designator J?
CONN FFC TOP 24POS 0.50MM R/A; Manufacturer: Molex; Manufacturer Part Number: 52435-2471; Current Rating: 500mA; Voltage Rating: 50V; Number of Positions: 24; Max Voltage Rating (DC): 5.05kV; Gender: Receptacle; Stackable: No; Pitch: 0.5mm; Supplier 1: Digi-Key; RoHS: Yes; Category: FFC / FPC; Stock 1: 1377; Pricing 1: 1=2.22000, 10=1.89200, 100=1.56290 (USD); Contact Material: Bronze; Contact Plating: Gold; Housing Material: Nylon; Min Operating Temperature: -40°C; Max Operating Temperature: 85°C; Packaging: Tape and Reel; Termination: Solder; Package Quantity: 1000; Number of Rows: 1; Number of Contacts: 24; Max Voltage Rating (AC): 50V; Orientation: Right Angle; Contact Location: Top; Number of Circuits: 24; Length: 18.6mm; Depth: 4.7mm; Radiation Hardening: No; REACH SVHC: Unknown; ComponentLink1URL: https://datasheet.ciiva.com/1484/1629121-1484657.pdf?src-supplier=Newark; ComponentLink1Description: https://datasheet.ciiva.com/1484/1629121-1484657.pdf?src-supplier=Newark; ComponentLink2URL: https://datasheet.ciiva.com/5137/0524352471-ffc-fpc-connectors-170593-5137745.pdf?src-supplier=Mouser; ComponentLink2Description: https://datasheet.ciiva.com/5137/0524352471-ffc-fpc-connectors-170593-5137745.pdf?src-supplier=Mouser; ComponentLink3URL: https://datasheet.ciiva.com/30088/283130524352471-ffc-fpc-nectors-30088679.pdf?src-supplier=Onlinecomponents.com; ComponentLink3Description: https://datasheet.ciiva.com/30088/283130524352471-ffc-fpc-nectors-30088679.pdf?src-supplier=Onlinecomponents.com; ComponentLink4URL: https://datasheet.ciiva.com/3925/128320524352471-ffc-fpc-nectors-3925353.pdf?src-supplier=Arrow+Electronics; ComponentLink4Description: https://datasheet.ciiva.com/3925/128320524352471-ffc-fpc-nectors-3925353.pdf?src-supplier=Arrow+Electronics; ComponentLink5URL: https://datasheet.ciiva.com/16659/0524352471-ffc-fpc-connectors-16659957.pdf?src-supplier=Avnet+Europe; ComponentLink5Description: https://datasheet.ciiva.com/16659/0524352471-ffc-fpc-connectors-16659957.pdf?src-supplier=Avnet+Europe; ComponentLink6URL: https://datasheet.ciiva.com/8038/1597798-8038390.pdf?src-supplier=Element14; ComponentLink6Description: https://datasheet.ciiva.com/8038/1597798-8038390.pdf?src-supplier=Element14; ComponentLink7URL: https://datasheet.ciiva.com/10364/0524352471-ffc-fpc-connectors-10364236.pdf?src-supplier=Avnet; ComponentLink7Description: https://datasheet.ciiva.com/10364/0524352471-ffc-fpc-connectors-10364236.pdf?src-supplier=Avnet; Supplier Part Number 1: WM7975CT-ND
footprint 0524352471
pins: 1, 2, 3, 4, 5, 6, 7, 8, 9, 10, 11, 12, 13, 14, 15, 16, 17, 18, 19, 20, 21, 22, 23, 24, MP1, MP2

## 0527460471
designator J?
CONN FFC BOTTOM 4POS 0.50MM R/A; Manufacturer: Molex; Manufacturer Part Number: 52746-0471; Actuator Material: Glass,Polyphenylene; Actuator Color: Brown; Current Rating: 500mA; Voltage Rating: 50V; Number of Positions: 4; Wire/Cable Type: Straight; Contact Resistance: 20mR; Mating Cycles: 20; Gender: Receptacle; Pitch: 0.5mm; Supplier 1: Digi-Key; RoHS: Yes; Category: FFC / FPC; Stock 1: 213; Pricing 1: 1=0.76000, 10=0.64000, 100=0.49810 (USD); Mount: Surface Mount; Contact Material: Bronze; Contact Plating: Gold; Housing Material: Nylon; Housing Color: Natural; Min Operating Temperature: -20°C; Max Operating Temperature: 85°C; Packaging: Tape and Reel; Termination: Solder; Package Quantity: 1; Number of Rows: 1; Number of Contacts: 4; Orientation: Right Angle; Series: Easy-On™ 52746; Contact Location: Bottom; Length: 8.1mm; Depth: 4.3mm; Radiation Hardening: No; Flammability Rating: UL94 V-0; REACH SVHC: Unknown; RoHS Compliant: Yes; ComponentLink1URL: https://datasheet.ciiva.com/8038/1597791-8038563.pdf?src-supplier=Element14; ComponentLink1Description: https://datasheet.ciiva.com/8038/1597791-8038563.pdf?src-supplier=Element14; ComponentLink2URL: https://datasheet.ciiva.com/11745/0900766b80dfdcc6-11745365.pdf?src-supplier=RSComponents; ComponentLink2Description: https://datasheet.ciiva.com/11745/0900766b80dfdcc6-11745365.pdf?src-supplier=RSComponents; ComponentLink3URL: https://datasheet.ciiva.com/15176/getdatasheetpartid-367391-15176714.pdf?src-supplier=Verical; ComponentLink3Description: https://datasheet.ciiva.com/15176/getdatasheetpartid-367391-15176714.pdf?src-supplier=Verical; Supplier Part Number 1: WM6768CT-ND
footprint 0527460471
pins: 1, 2, 3, 4, MP1, MP2

## 68710614022
designator J?  (value not drawn)
CONN FPC TOP 6POS 0.50MM R/A; Manufacturer: Wurth Electronics; Actuator Material: Polymer,Liquid Crystal Polymer; Current Rating: 500mA; Voltage Rating: 50V; Number of Positions: 6; Insulation Resistance: 100MR; Gender: Male; Pitch: 0.5mm; Supplier 1: Digi-Key; Manufacturer Part Number: 68710614022; RoHS: Yes; Category: FFC / FPC; Stock 1: 3457; Pricing 1: 1=0.92000, 10=0.88700, 50=0.82600, 100=0.76500, 500=0.70300, 1000=0.64200 (USD); Mount: Surface Mount; Contact Plating: Tin; Contact Material: Bronze,Tin; Housing Material: Liquid Crystal Polymer; Min Operating Temperature: -25°C; Max Operating Temperature: 85°C; Number of Rows: 1; Package Quantity: 1; Packaging: Tape and Reel; Termination: SMD/SMT; Contact Location: Top; Number of Contacts: 6; Orientation: Straight; Length: 9.5mm; Width: 2.1mm; REACH SVHC: Unknown; Flammability Rating: UL94 V-0; ComponentLink1URL: https://datasheet.ciiva.com/25617/0900766b81113bff-25617823.pdf?src-supplier=RSComponents; ComponentLink1Description: https://datasheet.ciiva.com/25617/0900766b81113bff-25617823.pdf?src-supplier=RSComponents; ComponentLink2URL: https://datasheet.ciiva.com/14153/6871xx14022-eng-datasheet-14153909.pdf?src-supplier=Distrelec; ComponentLink2Description: https://datasheet.ciiva.com/14153/6871xx14022-eng-datasheet-14153909.pdf?src-supplier=Distrelec; ComponentLink3URL: https://datasheet.ciiva.com/670/6871xx14022-670520.pdf?src-supplier=Digi-Key; ComponentLink3Description: https://datasheet.ciiva.com/670/6871xx14022-670520.pdf?src-supplier=Digi-Key; ComponentLink4URL: https://datasheet.ciiva.com/670/6871xx14022-670521.pdf?src-supplier=Digi-Key; ComponentLink4Description: https://datasheet.ciiva.com/670/6871xx14022-670521.pdf?src-supplier=Digi-Key; ComponentLink5URL: https://datasheet.ciiva.com/670/6871xx14022-670522.pdf?src-supplier=Digi-Key; ComponentLink5Description: https://datasheet.ciiva.com/670/6871xx14022-670522.pdf?src-supplier=Digi-Key; ComponentLink6URL: https://datasheet.ciiva.com/7662/6871xx14022-7662618.pdf?src-supplier=Element14; ComponentLink6Description: https://datasheet.ciiva.com/7662/6871xx14022-7662618.pdf?src-supplier=Element14; ComponentLink7URL: https://datasheet.ciiva.com/29318/709078-da-01-en-smd-zif-stecker-90grad-kontakte-oben-6-p-29318038.pdf?src-supplier=Conrad; ComponentLink7Description: https://datasheet.ciiva.com/29318/709078-da-01-en-smd-zif-stecker-90grad-kontakte-oben-6-p-29318038.pdf?src-supplier=Conrad; Supplier Part Number 1: 732-2018-1-ND
footprint 68710614022
pins: 1, 2, 3, 4, 5, 6, MP1, MP2

## 68714014022
designator J?
CONN FPC TOP 40POS 0.50MM R/A; Manufacturer: Wurth Electronics; Actuator Material: Polymer,Liquid Crystal Polymer; Current Rating: 500mA; Voltage Rating: 50V; Number of Positions: 40; Insulation Resistance: 100MR; Gender: Receptacle; Pitch: 0.5mm; Supplier 1: Digi-Key; Manufacturer Part Number: 68714014022; RoHS: Yes; Category: FFC / FPC; Stock 1: 5218; Pricing 1: 1=1.96000, 10=1.89700, 50=1.76600, 100=1.63500, 500=1.50500, 1000=1.37400 (USD); Mount: Surface Mount; Contact Plating: Tin; Contact Material: Bronze,Tin; Housing Material: Liquid Crystal Polymer; Min Operating Temperature: -25°C; Max Operating Temperature: 85°C; Number of Rows: 1; Package Quantity: 1; Packaging: Tape and Reel; Termination: Solder; Contact Location: Top; Number of Contacts: 40; Orientation: Straight; Length: 26.5mm; Width: 2.1mm; REACH SVHC: Unknown; Flammability Rating: UL94 V-0; ComponentLink1URL: https://datasheet.ciiva.com/8067/1707020-8067296.pdf?src-supplier=Element14; ComponentLink1Description: https://datasheet.ciiva.com/8067/1707020-8067296.pdf?src-supplier=Element14; ComponentLink2URL: https://datasheet.ciiva.com/25617/0900766b81113bff-25617752.pdf?src-supplier=RSComponents; ComponentLink2Description: https://datasheet.ciiva.com/25617/0900766b81113bff-25617752.pdf?src-supplier=RSComponents; ComponentLink3URL: https://datasheet.ciiva.com/670/6871xx14022-670666.pdf?src-supplier=Digi-Key; ComponentLink3Description: https://datasheet.ciiva.com/670/6871xx14022-670666.pdf?src-supplier=Digi-Key; ComponentLink4URL: https://datasheet.ciiva.com/670/6871xx14022-670667.pdf?src-supplier=Digi-Key; ComponentLink4Description: https://datasheet.ciiva.com/670/6871xx14022-670667.pdf?src-supplier=Digi-Key; ComponentLink5URL: https://datasheet.ciiva.com/670/6871xx14022-670668.pdf?src-supplier=Digi-Key; ComponentLink5Description: https://datasheet.ciiva.com/670/6871xx14022-670668.pdf?src-supplier=Digi-Key; ComponentLink6URL: https://datasheet.ciiva.com/14153/6871xx14022-eng-datasheet-14153919.pdf?src-supplier=Distrelec; ComponentLink6Description: https://datasheet.ciiva.com/14153/6871xx14022-eng-datasheet-14153919.pdf?src-supplier=Distrelec; Supplier Part Number 1: 732-3519-1-ND
footprint 68714014022
pins: 1, 2, 3, 4, 5, 6, 7, 8, 9, 10, 11, 12, 13, 14, 15, 16, 17, 18, 19, 20, 21, 22, 23, 24, 25, 26, 27, 28, 29, 30, 31, 32, 33, 34, 35, 36, 37, 38, 39, 40, MP1, MP2

## 74437324022
designator L?, comment 2.2uH
FIXED IND 2.2UH 3.25A 61 MOHM; Manufacturer: Wurth Electronics; Manufacturer Part Number: 74437324022; Core Material: Ferrite,Composite; Saturation Current: 6.5A; Tolerance: 20%; Shielding: Shielded; Self Resonant Frequency: 49MHz; DC Resistance (DCR): 61mR; Test Frequency: 100kHz; Supplier 1: Digi-Key; RoHS: Yes; Category: Fixed Inductors; Stock 1: 5747; Pricing 1: 1=2.20000, 10=2.15000, 50=1.97100, 100=1.88200, 500=1.79200, 1000=1.70201 (USD); Mount: Surface Mount; Case/Package: Nonstandard; Min Operating Temperature: -40°C; Max Operating Temperature: 125°C; Package Quantity: 3000; Current Rating: 3.25A; Packaging: Tape and Reel; Inductance Tolerance: 20%; Frequency: 49MHz; Resistor Type: Wirewound; Inductance: 2.2uH; Max DC Current: 3.25A; Termination: SMD/SMT; RMS Current (Irms): 3.25A; Series Resistance: 61mR; Series: WE-LHMI; Length: 4.45mm; Width: 4.06mm; Height: 1.8mm; Height - Seated (Max): 0.079inch; Depth: 4.06mm; REACH SVHC: Unknown; RoHS Compliant: Yes; ComponentLink1URL: https://datasheet.ciiva.com/1052/74437324022-1052161.pdf?src-supplier=Digi-Key; ComponentLink1Description: https://datasheet.ciiva.com/1052/74437324022-1052161.pdf?src-supplier=Digi-Key; ComponentLink2URL: https://datasheet.ciiva.com/4961/74437324022-83042-4961251.pdf?src-supplier=Mouser; ComponentLink2Description: https://datasheet.ciiva.com/4961/74437324022-83042-4961251.pdf?src-supplier=Mouser; ComponentLink3URL: https://datasheet.ciiva.com/7892/1735824-7892719.pdf?src-supplier=Element14; ComponentLink3Description: https://datasheet.ciiva.com/7892/1735824-7892719.pdf?src-supplier=Element14; ComponentLink4URL: https://datasheet.ciiva.com/25608/0900766b810c01e6-25608143.pdf?src-supplier=RSComponents; ComponentLink4Description: https://datasheet.ciiva.com/25608/0900766b810c01e6-25608143.pdf?src-supplier=RSComponents; ComponentLink5URL: https://datasheet.ciiva.com/1052/74437324022-1052162.pdf?src-supplier=Digi-Key; ComponentLink5Description: https://datasheet.ciiva.com/1052/74437324022-1052162.pdf?src-supplier=Digi-Key; ComponentLink6URL: https://datasheet.ciiva.com/1052/74437324022-1052163.pdf?src-supplier=Digi-Key; ComponentLink6Description: https://datasheet.ciiva.com/1052/74437324022-1052163.pdf?src-supplier=Digi-Key; ComponentLink7URL: https://datasheet.ciiva.com/48691/001087560-da-01-ml-we-lhmi-smd-speicherdrossel-744373-de-en-48691628.pdf?src-supplier=Conrad; ComponentLink7Description: https://datasheet.ciiva.com/48691/001087560-da-01-ml-we-lhmi-smd-speicherdrossel-744373-de-en-48691628.pdf?src-supplier=Conrad; Supplier Part Number 1: 732-3331-1-ND
footprint 74437324022
pins: 1, 2

## 693043020611
designator J?
CONN SMART CARD PUSH-PULL; Manufacturer: Wurth Electronics; Number of Positions: 6; Connector Type: Connector; Supplier 1: Digi-Key; Manufacturer Part Number: 693043020611; Stock 1: 21915; Pricing 1: 1=1.69, 10=1.663, 50=1.54, 100=1.417, 500=1.232 (USD); Mount: Surface Mount; Number of Pins: 6; Contact Material: Copper Alloy; Contact Plating: Gold; Packaging: Tape and Reel; Number of Contacts: 6; Features: Shielded; REACH SVHC: Unknown; Lead Free: Lead Free; Supplier Part Number 1: 732-5954-1-ND
footprint 693043020611 (CONN SMART CARD PUSH-PULL)
pins: C1 VCC, C2 RESET, C3 CLOCK, C5 GND, C6 VPP, C7 I/0, MP1, MP2, MP3, MP4, MP5, MP6

## A-DF 09 A/KG-T4S
designator J?
CONN D-SUB RCPT 9POS R/A SOLDER; Manufacturer: Assmann; Connector Type: D-Sub,Receptacle,Signal; Number of Positions: 9; Voltage Rating: 250V; Current Rating: 3A; Supplier 1: Digi-Key; Manufacturer Part Number: A-DF 09 A/KG-T4S; RoHS: Yes; Category: D-Sub Connectors; Stock 1: 19005; Pricing 1: 1=0.79000, 10=0.74200, 25=0.66800, 50=0.59380, 100=0.56910, 250=0.51964, 500=0.49490, 1000=0.40829, 2500=0.37118 (USD); Mount: Through Hole; Number of Pins: 9; Housing Material: PBT; Color: Black; Contact Plating: Gold; Contact Material: Copper Alloy; Min Operating Temperature: -55°C; Max Operating Temperature: 105°C; Packaging: Tray; Number of Rows: 2; Termination: Solder; Lead Free: Lead Free; Flammability Rating: UL94 V-0; ComponentLink1URL: http://www.assmann-wsw.com/fileadmin/datasheets/ASS_4888_CO.pdf?src-supplier=Digi-Key; ComponentLink1Description: http://www.assmann-wsw.com/fileadmin/datasheets/ASS_4888_CO.pdf?src-supplier=Digi-Key; Supplier Part Number 1: AE10924-ND
footprint A-DF 09 A/KG-T4S
pins: 1, 2, 3, 4, 5, 6, 7, 8, 9, MH1, MH2

## AC0201FR-071K2L
designator R?, comment 1.2K
RES SMD 1.2K OHM 1% 1/20W 0201; Manufacturer: Yageo; Manufacturer Part Number: AC0201FR-071K2L; Resistance: 1.2kR; Max Power Dissipation: 50mW; Temperature Coefficient: 200ppm/°C; Supplier 1: Digi-Key; RoHS: Yes; Category: Chip SMD Resistors; Stock 1: 2804; Pricing 1: 1=0.10000, 10=0.06300, 100=0.02560, 1000=0.01149, 2500=0.00997, 5000=0.00823 (USD); Case/Package: 0201; Min Operating Temperature: -55°C; Max Operating Temperature: 155°C; Packaging: Tape and Reel; Resistor Type: Thick Film; Number of Terminations: 2; Tolerance: 1%; Features: Moisture Resistant,Automotive AEC-Q200; Length: 0.024inch; Width: 0.012inch; Height: 0.01inch; RoHS Compliant: Yes; ComponentLink1URL: http://www.yageo.com/NewPortal/yageodocoutput?fileName=/pdf/R-Chip/PYu-AC_51_RoHS_L_5.pdf&src-supplier=Digi-Key; ComponentLink1Description: http://www.yageo.com/NewPortal/yageodocoutput?fileName=/pdf/R-Chip/PYu-AC_51_RoHS_L_5.pdf&src-supplier=Digi-Key; Supplier Part Number 1: YAG5168CT-ND
footprint Res-0201
pins: 1, 2

## AC0201FR-075K1L
designator R?, comment 5.1K
RES SMD 5.1K OHM 1% 1/20W 0201; Manufacturer: Yageo; Manufacturer Part Number: AC0201FR-075K1L; Resistance: 5.1kR; Max Power Dissipation: 50mW; Temperature Coefficient: 200ppm/°C; Supplier 1: Digi-Key; RoHS: Yes; Category: Chip SMD Resistors; Stock 1: 2998; Pricing 1: 1=0.10000, 10=0.06300, 100=0.02560, 1000=0.01149, 2500=0.00997, 5000=0.00823 (USD); Case/Package: 0201; Min Operating Temperature: -55°C; Max Operating Temperature: 155°C; Packaging: Tape and Reel; Resistor Type: Thick Film; Number of Terminations: 2; Tolerance: 1%; Features: Moisture Resistant,Automotive AEC-Q200; Length: 0.024inch; Width: 0.012inch; Height: 0.01inch; RoHS Compliant: Yes; ComponentLink1URL: http://www.yageo.com/NewPortal/yageodocoutput?fileName=/pdf/R-Chip/PYu-AC_51_RoHS_L_6.pdf&src-supplier=Digi-Key; ComponentLink1Description: http://www.yageo.com/NewPortal/yageodocoutput?fileName=/pdf/R-Chip/PYu-AC_51_RoHS_L_6.pdf&src-supplier=Digi-Key; ComponentLink2URL: http://www.yageo.com/NewPortal/yageodocoutput?fileName=/pdf/R-Chip/PYu-AC_51_RoHS_L_5.pdf&src-supplier=Digi-Key; ComponentLink2Description: http://www.yageo.com/NewPortal/yageodocoutput?fileName=/pdf/R-Chip/PYu-AC_51_RoHS_L_5.pdf&src-supplier=Digi-Key; Supplier Part Number 1: YAG5228CT-ND
footprint Res-0201
pins: 1, 2

## AC0201FR-076K8L
designator R?, comment 6.8K
RES SMD 6.8K OHM 1% 1/20W 0201; Manufacturer: Yageo; Manufacturer Part Number: AC0201FR-076K8L; Resistance: 6.8kR; Max Power Dissipation: 50mW; Temperature Coefficient: 200ppm/°C; Supplier 1: Digi-Key; RoHS: Yes; Category: Chip SMD Resistors; Stock 1: 17901; Pricing 1: 1=0.10000, 10=0.06300, 100=0.02560, 1000=0.01149, 2500=0.00997, 5000=0.00823 (USD); Case/Package: 0201; Min Operating Temperature: -55°C; Max Operating Temperature: 155°C; Packaging: Tape and Reel; Resistor Type: Thick Film; Number of Terminations: 2; Tolerance: 1%; Features: Moisture Resistant,Automotive AEC-Q200; Length: 0.024inch; Width: 0.012inch; Height: 0.01inch; RoHS Compliant: Yes; ComponentLink1URL: http://www.yageo.com/NewPortal/yageodocoutput?fileName=/pdf/R-Chip/PYu-AC_51_RoHS_L_6.pdf&src-supplier=Digi-Key; ComponentLink1Description: http://www.yageo.com/NewPortal/yageodocoutput?fileName=/pdf/R-Chip/PYu-AC_51_RoHS_L_6.pdf&src-supplier=Digi-Key; ComponentLink2URL: http://www.yageo.com/NewPortal/yageodocoutput?fileName=/pdf/R-Chip/PYu-AC_51_RoHS_L_5.pdf&src-supplier=Digi-Key; ComponentLink2Description: http://www.yageo.com/NewPortal/yageodocoutput?fileName=/pdf/R-Chip/PYu-AC_51_RoHS_L_5.pdf&src-supplier=Digi-Key; Supplier Part Number 1: YAG5238CT-ND
footprint Res-0201
pins: 1, 2